# Altium footprint library STPMotorControl_1.PcbLib: 84 footprints (part 6 of 6)
Each footprint in its own frame and in the unit in brackets; x right, y up, seen from the top. Pads: shape width x height; smd on the part's side, far side on the other; paste and mask are expansions set on the pad; w line width, h text height; cw(c..) or ccw(c..) is an arc to the next point about the centre after c.
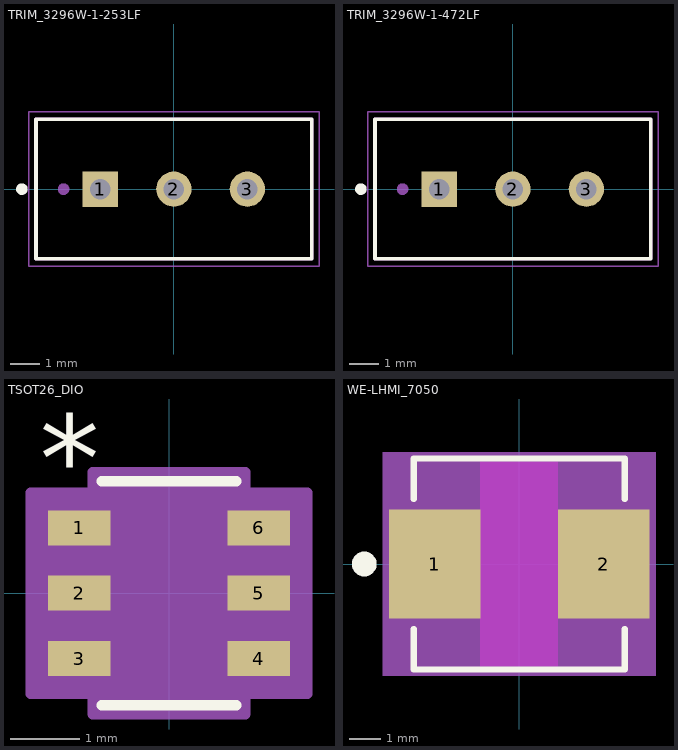
[diagram p5: the footprints below, top view; thin cyan lines are the x and y axes]

## TRIM_3296W-1-253LF [mm]
pads (3):
  rect 1.218x1.218 / inner round 1.218 / far side rect 1.218x1.218 hole 0.71 mask+0.102: 1(-2.54,0)
  round 1.218 hole 0.71 mask+0.102: 2(0,0) 3(2.54,0)
Top Overlay:
  circle w0.2: c-5.25,0 r0.1
  lines w0.127: -4.765,-2.41 4.765,-2.41 4.765,2.42 -4.765,2.42 -4.765,-2.41
Mechanical 13:
  circle w0.2: c-3.81,0 r0.1
  lines w0.127: -4.765,-2.41 -4.765,2.42 4.765,2.42 4.765,-2.41 -4.765,-2.41
Mechanical 15:
  lines w0.05: -5.015,-2.66 -5.015,2.67 5.015,2.67 5.015,-2.66 -5.015,-2.66
3D body "step_temp.STEP": height 11.55, standoff -7.72, extent -4.765,-2.41 4.765,2.42

## TRIM_3296W-1-472LF [mm]
pads (3):
  rect 1.218x1.218 / inner round 1.218 / far side rect 1.218x1.218 hole 0.71 mask+0.102: 1(-2.54,0)
  round 1.218 hole 0.71 mask+0.102: 2(0,0) 3(2.54,0)
Top Overlay:
  circle w0.2: c-5.25,0 r0.1
  lines w0.127: -4.765,-2.41 -4.765,2.42 4.765,2.42 4.765,-2.41 -4.765,-2.41
Mechanical 13:
  circle w0.2: c-3.81,0 r0.1
  lines w0.127: -4.765,-2.41 4.765,-2.41 4.765,2.42 -4.765,2.42 -4.765,-2.41
Mechanical 15:
  lines w0.05: -5.015,-2.66 5.015,-2.66 5.015,2.67 -5.015,2.67 -5.015,-2.66
3D body "step_temp.STEP": height 11.55, standoff -7.72, extent -4.765,-2.41 4.765,2.42

## TSOT26_DIO [mil]
pads (6):
  rect 35.5x20 smd paste+0 mask+0: 1(-51.25,37.4) 2(-51.25,0) 3(-51.25,-37.4) 4(51.25,-37.4) 5(51.25,0) 6(51.25,37.4)
Top Overlay:
  lines w6: -38.5,-64 38.5,-64 ; -38.5,64 38.5,64
  text "*" at -73.75,52.4 h50
  text ".Designator" at -137.5,-25 h50
Mechanical 13:
  lines w1: -12,59 ccw(c0,59) 12,59 ; -55,-46.4 -33.5,-46.4 -33.5,-28.4 -55,-28.4 -55,-46.4 ; -55,-9 -33.5,-9 -33.5,9 -55,9 -55,-9 ; -55,28.4 -33.5,28.4 -33.5,46.4 -55,46.4 -55,28.4 ; -33.5,-59 -33.5,59 33.5,59 33.5,-59 -33.5,-59 ; 33.5,-46.4 55,-46.4 55,-28.4 33.5,-28.4 33.5,-46.4 ; 33.5,-9 55,-9 55,9 33.5,9 33.5,-9 ; 33.5,28.4 55,28.4 55,46.4 33.5,46.4 33.5,28.4
  text ".Designator" at -137.5,-25 h50
  text "*" at -31,6 h50
Mechanical 15:
  region: -43.5,-57.4 -79,-57.4 -79,57.4 -43.5,57.4 -43.5,69 43.5,69 43.5,57.4 79,57.4 79,-57.4 43.5,-57.4 43.5,-69 -43.5,-69
  lines w6: -79,-57.4 -43.5,-57.4 -43.5,-69 43.5,-69 43.5,-57.4 79,-57.4 79,57.4 43.5,57.4 43.5,69 -43.5,69 -43.5,57.4 -79,57.4 -79,-57.4
3D body "TSOT26_DIO.step": height 39.09, standoff 0, extent -55,-59.02 55,59.02

## WE-LHMI_7050 [mm]
pads (2):
  rect 2.95x3.5 smd paste+0 mask+0.102: 1(-2.725,0) 2(2.725,0)
Top Overlay:
  circle w0.4: c-5,0 r0.2
  lines w0.2: -3.4,-2.1 -3.4,-3.4 3.4,-3.4 3.4,-2.1 ; -3.4,2.1 -3.4,3.4 3.4,3.4 3.4,2.1
Keep-Out Layer:
  region: 1.25,-3.3 -1.25,-3.3 -1.25,3.3 1.25,3.3
Mechanical 13:
  circle w0.4: c-0.7,0 r0.1
  lines w0.1: -3.3,-3.3 3.3,-3.3 3.3,3.3 -3.3,3.3 -3.3,-3.3
Mechanical 15:
  region: 4.4,-3.6 -4.4,-3.6 -4.4,3.6 4.4,3.6